# Altium footprint library Connector.PcbLib: 272 footprints (part 17 of 17)
Each footprint in its own frame and in the unit in brackets; x right, y up, seen from the top. Pads: shape width x height; smd on the part's side, far side on the other; paste and mask are expansions set on the pad; w line width, h text height; cw(c..) or ccw(c..) is an arc to the next point about the centre after c.
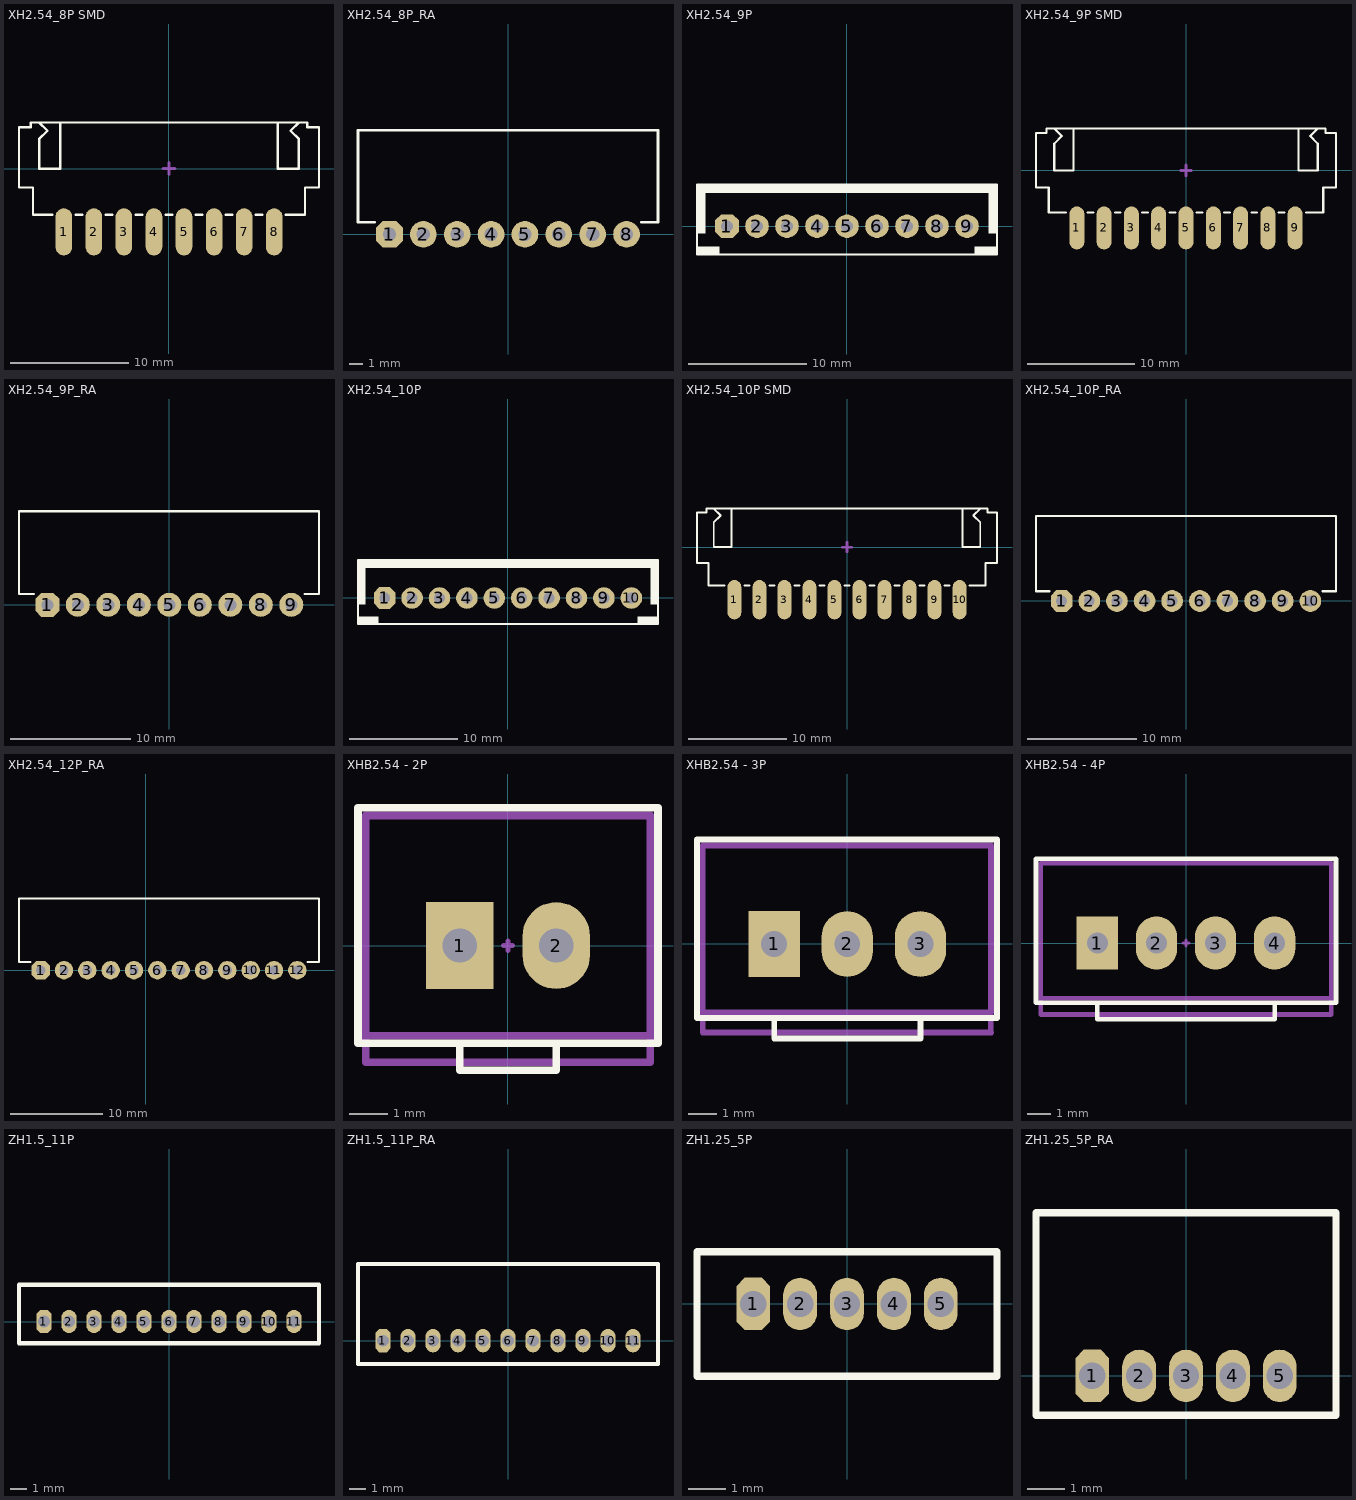
[diagram p16: the footprints below, top view; thin cyan lines are the x and y axes]

## XH2.54_8P SMD [mm] "XH2.54 SMD 2.54 mm"
pads (8):
  oval 1.4x4 smd: 1(-8.89,-5.35) 2(-6.35,-5.35) 3(-3.81,-5.35) 4(-1.27,-5.35) 5(1.27,-5.35) 6(3.81,-5.35) 7(6.35,-5.35) 8(8.89,-5.35)
Top Overlay:
  lines w0.2: -10.987,3.9 -10.287,3.2 -10.987,2.5 -10.987,0 -9.187,0 -9.187,3.9 ; -9.89,-3.9 -11.5,-3.9 -11.5,-1.6 -12.687,-1.6 -12.687,3.488 -11.702,3.488 -11.702,3.9 11.702,3.9 11.702,3.488 12.687,3.488 12.687,-1.6 11.5,-1.6 11.5,-3.9 9.89,-3.9 ; -7.89,-3.9 -7.35,-3.9 ; -5.35,-3.9 -4.81,-3.9 ; -2.81,-3.9 -2.27,-3.9 ; -0.27,-3.9 0.27,-3.9 ; 2.27,-3.9 2.81,-3.9 ; 4.81,-3.9 5.35,-3.9 ; 7.35,-3.9 7.89,-3.9 ; 9.187,3.9 9.187,0 10.987,0 10.987,2.5 10.287,3.2 10.987,3.9
Top Designator:
  lines w0.254: -0.5,0 0.5,0 ; 0,-0.5 0,0.5
  text ".Designator" at -3.71,1.156 h1.52
3D body "JST - XH - SMD (R) - 8Pin - 2.54mm.stp": height 5.92, standoff 0, extent -12.687,-5.953 12.687,3.953

## XH2.54_8P_RA [mm]
pads (8):
  oct 2x2 hole 1: 1(-8.89,0)
  round 2 hole 1: 2(-6.35,0) 3(-3.81,0) 4(-1.27,0) 5(1.27,0) 6(3.81,0) 7(6.35,0) 8(8.89,0)
Top Overlay:
  lines w0.2: -10,0.9 -11.25,0.9 -11.25,7.8 11.25,7.8 11.25,0.9 10,0.9
Top Designator:
  text ".Designator" at -3.71,3.055 h1.52
3D body "JST - XH - Thru (R) - 8Pin - 2.54mm.stp": height 5.84, standoff -3.38, extent -11.227,-0.336 11.227,7.7

## XH2.54_9P [mm] "PW10-xx-M, JST-BxB-XH-A pitch: 2.5mm"
pads (9):
  oct 2x2 hole 1: 1(-10.16,0)
  round 2 hole 1: 2(-7.62,0) 3(-5.08,0) 4(-2.54,0) 5(0,0) 6(2.54,0) 7(5.08,0) 8(7.62,0) 9(10.16,0)
Top Overlay:
  region: 12.7,-1.7 10.8,-1.7 10.8,-2.4 12.7,-2.4
  region: 12.7,3.5 12,3.5 12,-0.6 12.7,-0.6
  region: -12.7,3.5 -12.7,2.8 12.7,2.8 12.7,3.5
  rectangle: -12.7,-0.6 -12,3.5
  rectangle: -12.7,-2.4 -10.8,-1.7
  lines w0.2: -12.7,-2.4 -12.7,3.5 12.7,3.5 12.7,-2.4 -12.7,-2.4
Top Designator:
  text ".Designator" at -3.71,0.206 h1.52
3D body "JST - XH - Thru (V) - 9Pin - 2.54mm.stp": height 7.21, standoff -3, extent -12.497,-2.471 12.497,3.371

## XH2.54_9P SMD [mm] "XH2.54 SMD 2.54 mm"
pads (9):
  oval 1.4x4 smd: 1(-10.16,-5.35) 2(-7.62,-5.35) 3(-5.08,-5.35) 4(-2.54,-5.35) 5(0,-5.35) 6(2.54,-5.35) 7(5.08,-5.35) 8(7.62,-5.35) 9(10.16,-5.35)
Top Overlay:
  lines w0.2: -12.257,3.9 -11.557,3.2 -12.257,2.5 -12.257,0 -10.457,0 -10.457,3.9 ; -11.16,-3.9 -12.77,-3.9 -12.77,-1.6 -13.957,-1.6 -13.957,3.488 -12.972,3.488 -12.972,3.9 12.972,3.9 12.972,3.488 13.957,3.488 13.957,-1.6 12.77,-1.6 12.77,-3.9 11.16,-3.9 ; -9.16,-3.9 -8.62,-3.9 ; -6.62,-3.9 -6.08,-3.9 ; -4.08,-3.9 -3.54,-3.9 ; -1.54,-3.9 -1,-3.9 ; 1,-3.9 1.54,-3.9 ; 3.54,-3.9 4.08,-3.9 ; 6.08,-3.9 6.62,-3.9 ; 8.62,-3.9 9.16,-3.9 ; 10.457,3.9 10.457,0 12.257,0 12.257,2.5 11.557,3.2 12.257,3.9
Top Designator:
  lines w0.254: -0.5,0 0.5,0 ; 0,-0.5 0,0.5
  text ".Designator" at -3.71,1.156 h1.52
3D body "JST - XH - SMD (R) - 9Pin - 2.54mm.stp": height 5.92, standoff 0, extent -13.957,-5.953 13.957,3.953

## XH2.54_9P_RA [mm]
pads (9):
  oct 2x2 hole 1: 1(-10.16,0)
  round 2 hole 1: 2(-7.62,0) 3(-5.08,0) 4(-2.54,0) 5(0,0) 6(2.54,0) 7(5.08,0) 8(7.62,0) 9(10.16,0)
Top Overlay:
  lines w0.2: -11.27,0.9 -12.52,0.9 -12.52,7.8 12.47,7.8 12.47,0.9 11.27,0.9
Top Designator:
  text ".Designator" at -2.44,3.055 h1.52
3D body "JST - XH - Thru (R) - 8Pin - 2.54mm.stp": height 5.84, standoff -3.38, extent -9.984,-0.137 12.47,7.9
3D body "JST - XH - Thru (R) - 8Pin - 2.54mm.stp": height 5.84, standoff -3.38, extent -12.557,-0.137 9.897,7.9

## XH2.54_10P [mm] "PW10-xx-M, JST-BxB-XH-A pitch: 2.5mm"
pads (10):
  oct 2x2 hole 1: 1(-11.43,0)
  round 2 hole 1: 2(-8.89,0) 3(-6.35,0) 4(-3.81,0) 5(-1.27,0) 6(1.27,0) 7(3.81,0) 8(6.35,0) 9(8.89,0) 10(11.43,0)
Top Overlay:
  region: 13.9,-1.7 12,-1.7 12,-2.4 13.9,-2.4
  region: 13.9,3.5 13.2,3.5 13.2,-0.6 13.9,-0.6
  region: -13.9,3.5 -13.9,2.8 13.9,2.8 13.9,3.5
  rectangle: -13.9,-0.6 -13.2,3.5
  rectangle: -13.9,-2.4 -12,-1.7
  lines w0.2: -13.9,-2.4 -13.9,3.5 13.9,3.5 13.9,-2.4 -13.9,-2.4
Top Designator:
  text ".Designator" at -3.71,0.206 h1.52
3D body "JST - XH - Thru (V) - 10Pin - 2.54mm.stp": height 7.21, standoff -3, extent -13.767,-2.471 13.767,3.371

## XH2.54_10P SMD [mm] "XH2.54 SMD 2.54 mm"
pads (10):
  oval 1.4x4 smd: 1(-11.43,-5.35) 2(-8.89,-5.35) 3(-6.35,-5.35) 4(-3.81,-5.35) 5(-1.27,-5.35) 6(1.27,-5.35) 7(3.81,-5.35) 8(6.35,-5.35) 9(8.89,-5.35) 10(11.43,-5.35)
Top Overlay:
  lines w0.2: -13.527,3.9 -12.827,3.2 -13.527,2.5 -13.527,0 -11.727,0 -11.727,3.9 ; -12.43,-3.9 -14.04,-3.9 -14.04,-1.6 -15.227,-1.6 -15.227,3.488 -14.242,3.488 -14.242,3.9 14.242,3.9 14.242,3.488 15.227,3.488 15.227,-1.6 14.04,-1.6 14.04,-3.9 12.43,-3.9 ; -10.43,-3.9 -9.89,-3.9 ; -7.89,-3.9 -7.35,-3.9 ; -5.35,-3.9 -4.81,-3.9 ; -2.81,-3.9 -2.27,-3.9 ; -0.27,-3.9 0.27,-3.9 ; 2.27,-3.9 2.81,-3.9 ; 4.81,-3.9 5.35,-3.9 ; 7.35,-3.9 7.89,-3.9 ; 9.89,-3.9 10.43,-3.9 ; 11.727,3.9 11.727,0 13.527,0 13.527,2.5 12.827,3.2 13.527,3.9
Top Designator:
  lines w0.254: -0.5,0 0.5,0 ; 0,-0.5 0,0.5
  text ".Designator" at -3.71,1.156 h1.52
3D body "JST - XH - SMD (R) - 10Pin - 2.54mm.stp": height 5.92, standoff 0, extent -15.227,-5.953 15.227,3.953

## XH2.54_10P_RA [mm]
pads (10):
  oct 2x2 hole 1: 1(-11.43,0)
  round 2 hole 1: 2(-8.89,0) 3(-6.35,0) 4(-3.81,0) 5(-1.27,0) 6(1.27,0) 7(3.81,0) 8(6.35,0) 9(8.89,0) 10(11.43,0)
Top Overlay:
  lines w0.2: -12.54,0.9 -13.79,0.9 -13.79,7.8 13.79,7.8 13.79,0.9 12.54,0.9
Top Designator:
  text ".Designator" at -3.71,3.055 h1.52
3D body "JST - XH - Thru (R) - 8Pin - 2.54mm.stp": height 5.84, standoff -3.38, extent -8.727,-0.536 13.727,7.5
3D body "JST - XH - Thru (R) - 8Pin - 2.54mm.stp": height 5.84, standoff -3.38, extent -13.827,-0.536 8.627,7.5

## XH2.54_12P_RA [mm]
pads (12):
  oct 2x2 hole 1: 1(-11.43,0)
  round 2 hole 1: 2(-8.89,0) 3(-6.35,0) 4(-3.81,0) 5(-1.27,0) 6(1.27,0) 7(3.81,0) 8(6.35,0) 9(8.89,0) 10(11.43,0) 11(13.97,0) 12(16.51,0)
Top Overlay:
  lines w0.2: -12.54,0.9 -13.79,0.9 -13.79,7.8 18.87,7.8 18.87,0.9 17.62,0.9
Top Designator:
  text ".Designator" at -1.17,3.055 h1.52
3D body "JST - XH - Thru (R) - 8Pin - 2.54mm.stp": height 5.84, standoff -3.38, extent -13.827,-0.536 8.627,7.5
3D body "JST - XH - Thru (R) - 8Pin - 2.54mm.stp": height 5.84, standoff -3.38, extent -3.647,-0.536 18.807,7.5

## XHB2.54 - 2P [mil]
height 200
pads (2):
  rect 70x90 hole 35.43: 1(-50,0)
  oval 70x90 hole 35.43: 2(50,0)
Top Overlay:
  lines w7.87: -155.51,-101.38 155.51,-101.38 ; -155.51,-101.38 -50,-101.38 -50,-129.09 50,-129.09 50,-101.38 155.51,-101.38 ; -155.51,-101.38 -155.51,142.72 155.51,142.72 155.51,-101.38
Top Designator:
  text ".Designator" at -146.08,-6.73 h60
Mechanical 15:
  lines w5: -5,0 5,0 ; 0,-5 0,5
  lines w7.87: -147.64,134.84 -147.64,-93.5 147.64,-93.5 147.64,134.84 ; -147.64,134.84 -147.64,-121.06 147.64,-121.06 147.64,134.84 ; -147.64,134.84 147.64,134.84
3D body "XHB2.54-2PIN-white-with lock.STEP": height 275.59, standoff -118.11, extent -147.64,-125.16 147.64,118.94

## XHB2.54 - 3P [mil]
height 200
pads (3):
  rect 70x90 hole 35.43: 1(-100,0)
  oval 70x90 hole 35.43: 2(0,0) 3(100,0)
Top Overlay:
  lines w7.87: -205.51,-101.38 -205.51,142.72 ; -204.72,-101.38 204.72,-101.38 204.72,142.72 -204.72,142.72 ; -100,-101.38 -100,-129.09 100,-129.09 100,-101.38
Top Designator:
  text ".Designator" at -146.47,-6.73 h60
Mechanical 15:
  lines w5: -5,0 5,0 ; 0,-5 0,5
  lines w7.87: -197.64,-121.06 -197.64,134.84 -197.64,-93.5 ; -196.85,-121.06 196.85,-121.06 ; -196.85,-93.5 196.85,-93.5 196.85,134.84 -196.85,134.84 ; 196.06,-121.06 196.06,134.84
3D body "XHB2.54-3PIN-white-with lock.STEP": height 275.59, standoff -118.11, extent -196.85,-129.09 196.85,122.87

## XHB2.54 - 4P [mil]
height 200
pads (4):
  rect 70x90 hole 35.43: 1(-150,0)
  oval 70x90 hole 35.43: 2(-50,0) 3(50,0) 4(150,0)
Top Overlay:
  lines w7.87: -150,-101.38 -150,-129.09 150,-129.09 150,-101.38 ; -253.94,-101.38 -253.94,142.72 253.94,142.72 253.94,-101.38 -253.94,-101.38
Top Designator:
  text ".Designator" at -146.08,-6.73 h60
Mechanical 15:
  lines w5: -5,0 5,0 ; 0,-5 0,5
  lines w7.87: -246.06,-93.5 246.06,-93.5 246.06,134.84 ; 246.06,134.84 -246.06,134.84 -246.06,-121.06 246.06,-121.06 246.06,134.84
3D body "XHB2.54-4PIN-white-with lock.STEP": height 275.59, standoff -118.11, extent -244.09,-125.16 244.09,118.94

## ZH1.5_11P [mm]
pads (11):
  oct 0.9x1.4 hole 0.7: 1(-7.5,0)
  oval 0.9x1.4 hole 0.7: 2(-6,0) 3(-4.5,0) 4(-3,0) 5(-1.5,0) 6(0,0) 7(1.5,0) 8(3,0) 9(4.5,0) 10(6,0) 11(7.5,0)
Top Overlay:
  lines w0.254: -9,-1.3 9,-1.3 9,2.2 -9,2.2 -9,-1.3
Top Designator:
  text ".Designator" at -3.71,1.156 h1.52
3D body "B11B-ZR.step": height 4.5, standoff -2.7, extent -9,-1.3 9,2.2

## ZH1.5_11P_RA [mm]
pads (11):
  oct 0.9x1.4 hole 0.7: 1(-7.5,0)
  oval 0.9x1.4 hole 0.7: 2(-6,0) 3(-4.5,0) 4(-3,0) 5(-1.5,0) 6(0,0) 7(1.5,0) 8(3,0) 9(4.5,0) 10(6,0) 11(7.5,0)
Top Overlay:
  lines w0.254: -9,-1.4 9,-1.4 9,4.6 -9,4.6 -9,-1.4
Top Designator:
  text ".Designator" at -3.71,1.556 h1.52
3D body "S11B-ZR.step": height 3.7, standoff -2.7, extent -9,-1.4 9,4.6

## ZH1.25_5P [mm]
pads (5):
  oct 0.9x1.4 hole 0.7: 1(-2.5,0)
  oval 0.9x1.4 hole 0.7: 2(-1.25,0) 3(0,0) 4(1.25,0) 5(2.5,0)
Top Overlay:
  lines w0.2: -4,-1.93 4,-1.93 4,1.397 -4,1.397 -4,-1.93
Top Designator:
  text ".Designator" at -3.71,-1.844 h1.52
3D body "JST - GH - Thru (V) - 5Pin - 1.25mm.stp": height 4.23, standoff -2.25, extent -3.998,-1.93 3.998,1.397

## ZH1.25_5P_RA [mm]
pads (5):
  oct 0.9x1.4 hole 0.7: 1(-2.5,0)
  oval 0.9x1.4 hole 0.7: 2(-1.25,0) 3(0,0) 4(1.25,0) 5(2.5,0)
Top Overlay:
  lines w0.2: -4,-1.05 -4,4.35 4,4.35 4,-1.05 -4,-1.05
Top Designator:
  text ".Designator" at -3.71,1.306 h1.52
3D body "JST - GH - Thru (R) - 5Pin - 1.25mm.stp": height 3.33, standoff -2.16, extent -3.998,-0.179 3.998,4.316